# Altium footprint library KM_ALTIUM.PcbLib: 265 footprints (part 16 of 17)
Each footprint in its own frame and in the unit in brackets; x right, y up, seen from the top. Pads: shape width x height; smd on the part's side, far side on the other; paste and mask are expansions set on the pad; w line width, h text height; cw(c..) or ccw(c..) is an arc to the next point about the centre after c.
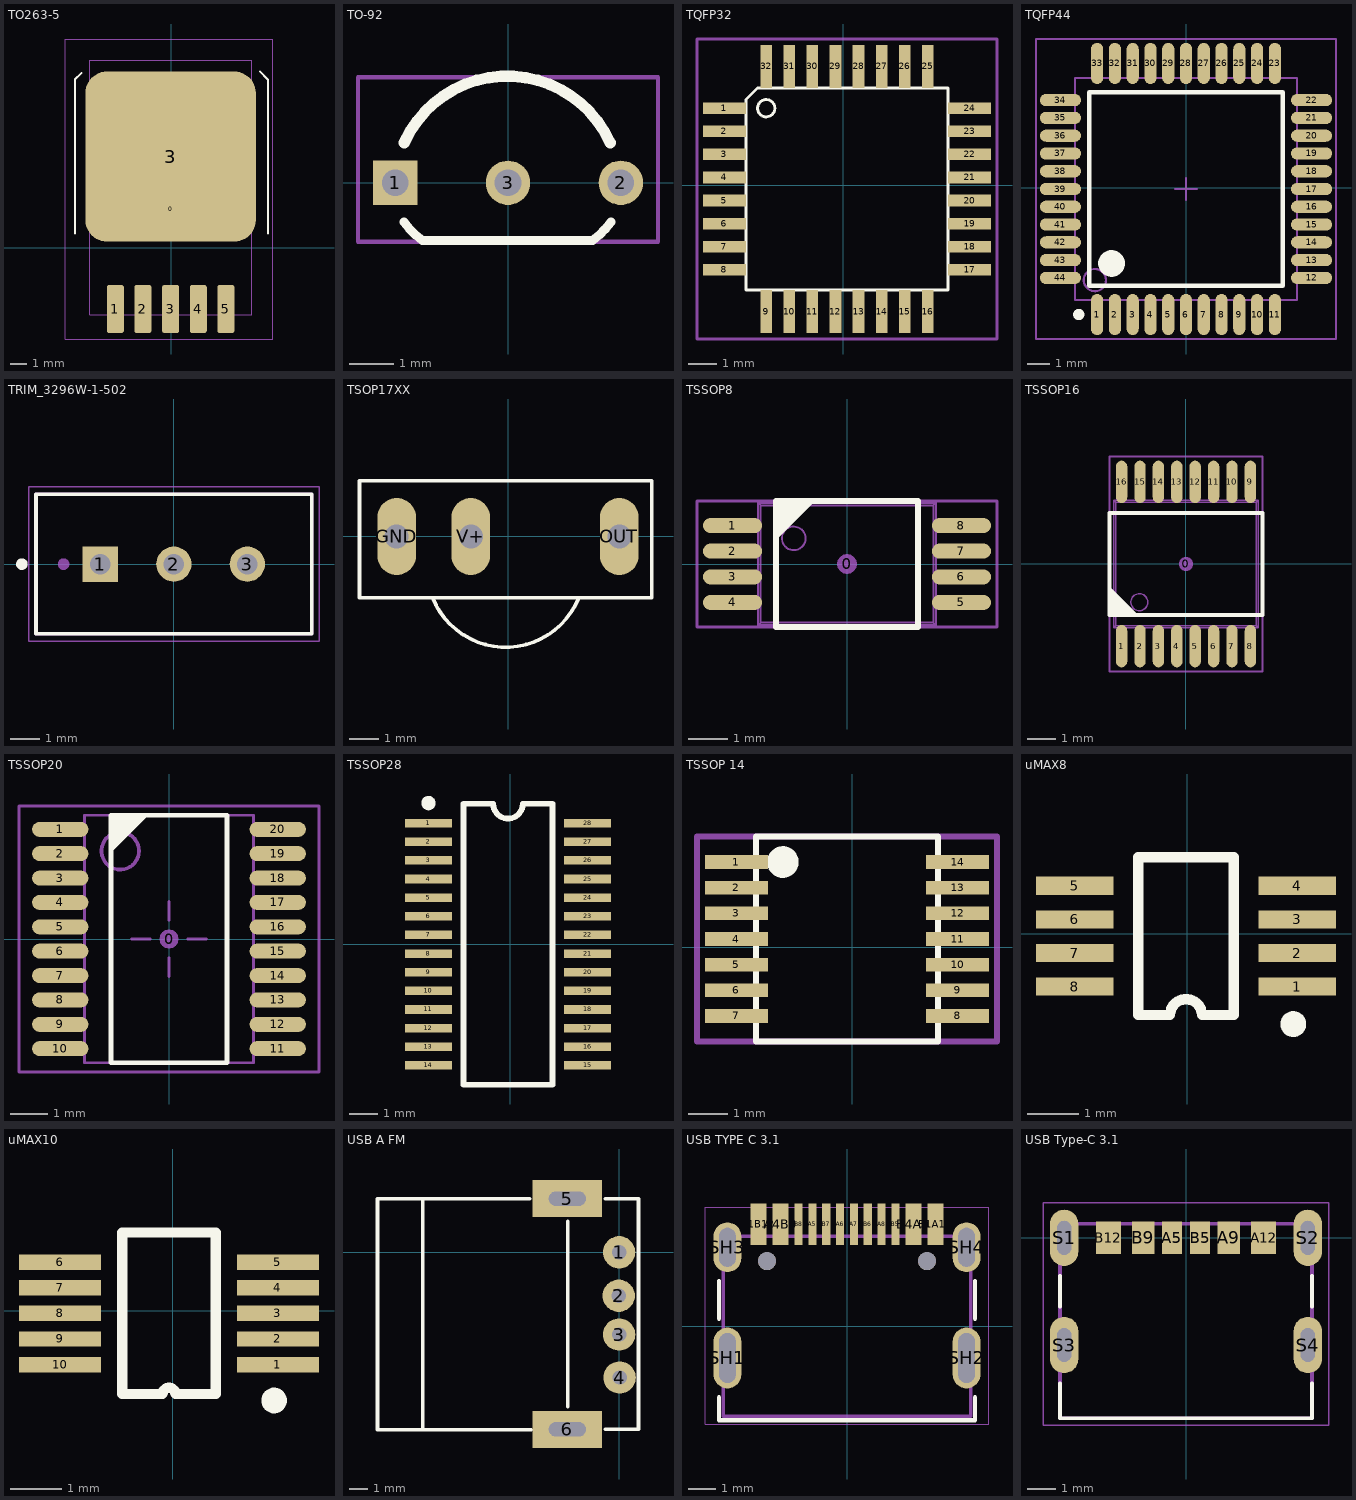
[diagram p15: the footprints below, top view; thin cyan lines are the x and y axes]

## TO263-5 [mm]
pads (7):
  round 0.5 on Mech15: 0(-0.025,2.388)
  rrect25% 1.05x2.95 smd: 1(-3.435,-3.762) 2(-1.73,-3.762) 3(-0.025,-3.762) 4(1.68,-3.762) 5(3.385,-3.762)
  rrect25% 10.5x10.5 smd: 3(-0.025,5.638)
Top Overlay:
  lines w0.127: -5.925,0.888 -5.925,10.388 -5.525,10.788 ; 5.475,10.888 5.975,10.388 5.975,0.888
Mechanical 13:
  lines w0.076: -5.025,-4.102 -5.025,11.568 4.975,11.568 4.975,-4.102 -5.025,-4.102
Mechanical 15:
  lines w0.076: -6.525,-5.612 -6.525,12.888 6.275,12.888 6.275,-5.612 -6.525,-5.612
3D body "TO-263-5.stp": height 4.56, standoff 0, extent -5.106,-4.34 5.054,9.675

## TO-92 [mm]
pads (3):
  rect 1x1 hole 0.6: 1(-2.54,0)
  round 1 hole 0.6: 2(2.54,0) 3(0,0)
Top Overlay:
  lines w0.2: -2.342,-0.884 ccw(c-0.93,0.113) -1.925,-1.3 ; -1.9,-1.3 1.9,-1.3 ccw(c0.905,0.113) 2.317,-0.884
  lines w0.254: -2.335,0.9 cw(c-0.017,-0.14) 2.3,0.9
Mechanical 15:
  lines w0.1: -3.377,-1.325 -3.377,2.375 3.377,2.375 3.377,-1.325 -3.377,-1.325
3D body "p210_TO-92.stp": height 8.6, standoff -8.5, extent -2.74,-1.28 2.74,2.32

## TQFP32 [mm]
pads (32):
  rect 1.5x0.406 smd: 1(-4.123,2.673) 2(-4.123,1.873) 3(-4.123,1.073) 4(-4.123,0.273) 5(-4.123,-0.527) 6(-4.123,-1.327) 7(-4.123,-2.127) 8(-4.123,-2.927) 17(4.377,-2.927) 18(4.377,-2.127) 19(4.377,-1.327) 20(4.377,-0.527) 21(4.377,0.273) 22(4.377,1.073) 23(4.377,1.873) 24(4.377,2.673)
  rect 0.406x1.5 smd: 9(-2.673,-4.377) 10(-1.873,-4.377) 11(-1.073,-4.377) 12(-0.273,-4.377) 13(0.527,-4.377) 14(1.327,-4.377) 15(2.127,-4.377) 16(2.927,-4.377) 25(2.927,4.123) 26(2.127,4.123) 27(1.327,4.123) 28(0.527,4.123) 29(-0.273,4.123) 30(-1.073,4.123) 31(-1.873,4.123) 32(-2.673,4.123)
Top Overlay:
  circle w0.102: c-2.673,2.673 r0.3
  lines w0.102: -3.373,-3.627 -3.373,2.977 -2.977,3.373 3.627,3.373 3.627,-3.627 -3.373,-3.627
Mechanical 3:
  lines w0.102: -5.073,-5.327 -5.073,5.073 5.327,5.073 5.327,-5.327 -5.073,-5.327
3D body "User Library-TQFP-32.STEP": height 1.45, standoff -0.01, extent -4.373,-4.627 4.627,4.373

## TQFP44 [mm]
pads (44):
  oval 0.55x1.85 smd: 1(-4,-5.701) 2(-3.2,-5.701) 3(-2.4,-5.701) 4(-1.6,-5.701) 5(-0.8,-5.701) 6(0,-5.701) 7(0.8,-5.701) 8(1.6,-5.701) 9(2.4,-5.701) 10(3.2,-5.701) 11(4,-5.701) 23(4,5.599) 24(3.2,5.599) 25(2.4,5.599) 26(1.6,5.599) 27(0.8,5.599) 28(0,5.599) 29(-0.8,5.599) 30(-1.6,5.599) 31(-2.4,5.599) 32(-3.2,5.599) 33(-4,5.599)
  oval 1.85x0.55 smd: 12(5.65,-4.051) 13(5.65,-3.251) 14(5.65,-2.451) 15(5.65,-1.651) 16(5.65,-0.851) 17(5.65,-0.051) 18(5.65,0.749) 19(5.65,1.549) 20(5.65,2.349) 21(5.65,3.149) 22(5.65,3.949) 34(-5.65,3.949) 35(-5.65,3.149) 36(-5.65,2.349) 37(-5.65,1.549) 38(-5.65,0.749) 39(-5.65,-0.051) 40(-5.65,-0.851) 41(-5.65,-1.651) 42(-5.65,-2.451) 43(-5.65,-3.251) 44(-5.65,-4.051)
Top Overlay:
  circle w0.25: c-4.825,-5.701 r0.125
  circle w0.6: c-3.35,-3.401 r0.3
  lines w0.2: -4.35,-4.401 4.35,-4.401 4.35,4.299 -4.35,4.299 -4.35,-4.401
Mechanical 13:
  circle w0.1: c-4.1,-4.151 r0.5
  lines w0.1: -5,-5.051 5,-5.051 5,4.949 -5,4.949 -5,-5.051
Mechanical 15:
  lines w0.1: -0.5,-0.051 0.5,-0.051 ; 0,-0.551 0,0.449 ; -6.75,-6.801 6.75,-6.801 6.75,6.699 -6.75,6.699 -6.75,-6.801
3D body "User Library-TQFP44-1.STEP": height 1.1, standoff 0, extent -6.009,-6.085 6.009,5.933

## TRIM_3296W-1-502 [mm]
pads (3):
  rect 1.218x1.218 hole 0.71: 1(-2.54,0)
  round 1.218 hole 0.71: 2(0,0) 3(2.54,0)
Top Overlay:
  circle w0.2: c-5.25,0 r0.1
  lines w0.127: -4.765,-2.41 4.765,-2.41 4.765,2.42 -4.765,2.42 -4.765,-2.41
Mechanical 13:
  circle w0.2: c-3.81,0 r0.1
  lines w0.127: -4.765,-2.41 -4.765,2.42 4.765,2.42 4.765,-2.41 -4.765,-2.41
Mechanical 15:
  lines w0.05: -5.015,-2.66 -5.015,2.67 5.015,2.67 5.015,-2.66 -5.015,-2.66
3D body "step_temp.STEP": height 11.55, standoff -7.72, extent -4.765,-2.41 4.765,2.42

## TSOP17XX [mil]
pads (3):
  oval 52x104 hole 32: GND(-150,0) OUT(150,0) V+(-50,0)
Top Overlay:
  lines w5: -101.44,-82.82 ccw(c-3.15,-43.11) 95.14,-82.82 ; -200,-82.48 -200,75 -101.57,75 95.28,75 193.7,75 193.7,-82.48 95.28,-82.48 -101.57,-82.48 -200,-82.48
3D body "step_temp.STEP": height 1224.41, standoff 0, extent -196.85,-165.35 196.85,62.99

## TSSOP8 [mm]
pads (9):
  round 0.508 on Mech15: 0(0,0)
  oval 1.5x0.38 smd paste-0.051: 1(-2.9,0.975) 2(-2.9,0.325) 3(-2.9,-0.325) 4(-2.9,-0.975) 5(2.9,-0.975) 6(2.9,-0.325) 7(2.9,0.325) 8(2.9,0.975)
Top Overlay:
  region: -1.8,1.6 -0.8,1.6 -1.8,0.6
  lines w0.152: -1.8,-1.6 -1.8,1.6 1.8,1.6 1.8,-1.6 -1.8,-1.6
  text "." at -2.85,1.7 h0.1
Top Solder:
  rectangle: -3.5,-1.016 -2.3,1.016
  region: 3.5,1.016 2.3,1.016 2.3,-1.016 3.5,-1.016
Mechanical 13:
  circle w0.05: c-1.35,0.65 r0.3
  lines w0.05: -2.839,-1.125 -2.839,-0.825 ; -2.839,-0.475 -2.839,-0.175 ; -2.839,0.175 -2.839,0.475 ; -2.839,0.825 -2.839,1.125 ; -2.795,-1.125 -2.795,-0.825 ; -2.795,-0.475 -2.795,-0.175 ; -2.795,0.175 -2.795,0.475 ; -2.795,0.825 -2.795,1.125 ; -2.693,-1.125 -2.693,-0.825 ; -2.693,-0.475 -2.693,-0.175 ; -2.693,0.175 -2.693,0.475 ; -2.693,0.825 -2.693,1.125 ; -2.5,-1.125 -2.5,-0.825 ; -2.5,-0.475 -2.5,-0.175 ; -2.5,0.175 -2.5,0.475 ; -2.5,0.825 -2.5,1.125 ; -2.25,-1.125 -3.25,-1.125 -3.25,-0.825 -2.25,-0.825 ; -2.25,-0.475 -3.25,-0.475 -3.25,-0.175 -2.25,-0.175 ; -2.25,0.175 -3.25,0.175 -3.25,0.475 -2.25,0.475 ; -2.25,0.825 -3.25,0.825 -3.25,1.125 -2.25,1.125 ; 2.25,-1.125 3.25,-1.125 3.25,-0.825 2.25,-0.825 ; 2.25,-0.475 3.25,-0.475 3.25,-0.175 2.25,-0.175 ; 2.25,0.175 3.25,0.175 3.25,0.475 2.25,0.475 ; 2.25,0.825 3.25,0.825 3.25,1.125 2.25,1.125 ; 2.5,-1.125 2.5,-0.825 ; 2.5,-0.475 2.5,-0.175 ; 2.5,0.175 2.5,0.475 ; 2.5,0.825 2.5,1.125 ; 2.693,-1.125 2.693,-0.825 ; 2.693,-0.475 2.693,-0.175 ; 2.693,0.175 2.693,0.475 ; 2.693,0.825 2.693,1.125 ; 2.795,-1.125 2.795,-0.825 ; 2.795,-0.475 2.795,-0.175 ; 2.795,0.175 2.795,0.475 ; 2.795,0.825 2.795,1.125 ; 2.839,-1.125 2.839,-0.825 ; 2.839,-0.475 2.839,-0.175 ; 2.839,0.175 2.839,0.475 ; 2.839,0.825 2.839,1.125 ; -2.25,-1.55 -2.25,1.55 ; -2.25,-1.55 -2.187,-1.487 ; -2.25,-1.55 2.25,-1.55 ; -2.25,1.55 2.25,1.55 ; -2.25,1.55 -2.187,1.487 ; -2.187,-1.487 -2.187,1.487 ; -2.187,-1.487 2.187,-1.487 ; -2.187,1.487 2.187,1.487 ; 2.187,-1.487 2.187,1.487 ; 2.187,-1.487 2.25,-1.55 ; 2.187,1.487 2.25,1.55 ; 2.25,-1.55 2.25,1.55
Mechanical 15:
  lines w0.076: -3.8,-1.6 -3.8,1.6 3.8,1.6 3.8,-1.6 -3.8,-1.6
3D body "TSSOP-8.STEP": height 1.19, standoff -0.01, extent -3.25,-1.55 3.25,1.55

## TSSOP16 [mm]
pads (17):
  round 0.508 on Mech15: 0(0,0)
  oval 0.4x1.5 smd paste-0.051: 1(-2.275,-2.9) 2(-1.625,-2.9) 3(-0.975,-2.9) 4(-0.325,-2.9) 5(0.325,-2.9) 6(0.975,-2.9) 7(1.625,-2.9) 8(2.275,-2.9) 9(2.275,2.9) 10(1.625,2.9) 11(0.975,2.9) 12(0.325,2.9) 13(-0.325,2.9) 14(-0.975,2.9) 15(-1.625,2.9) 16(-2.275,2.9)
Top Overlay:
  region: -2.7,-1.8 -2.7,-0.8 -1.7,-1.8
  lines w0.152: -2.7,-1.8 -2.7,1.8 2.7,1.8 2.7,-1.8 -2.7,-1.8
  text "." at -3,-2.85 h0.1
Top Solder:
  region: -2.4,3.5 -2.4,2.3 2.4,2.3 2.4,3.5
  region: 2.4,-3.5 2.4,-2.3 -2.4,-2.3 -2.4,-3.5
Mechanical 13:
  circle w0.05: c-1.65,-1.35 r0.3
  lines w0.05: -2.425,-2.839 -2.125,-2.839 ; -2.425,-2.795 -2.125,-2.795 ; -2.425,-2.693 -2.125,-2.693 ; -2.425,-2.5 -2.125,-2.5 ; -2.425,-2.25 -2.425,-3.25 -2.125,-3.25 -2.125,-2.25 ; -2.425,2.25 -2.425,3.25 -2.125,3.25 -2.125,2.25 ; -2.425,2.5 -2.125,2.5 ; -2.425,2.693 -2.125,2.693 ; -2.425,2.795 -2.125,2.795 ; -2.425,2.839 -2.125,2.839 ; -1.775,-2.839 -1.475,-2.839 ; -1.775,-2.795 -1.475,-2.795 ; -1.775,-2.693 -1.475,-2.693 ; -1.775,-2.5 -1.475,-2.5 ; -1.775,-2.25 -1.775,-3.25 -1.475,-3.25 -1.475,-2.25 ; -1.775,2.25 -1.775,3.25 -1.475,3.25 -1.475,2.25 ; -1.775,2.5 -1.475,2.5 ; -1.775,2.693 -1.475,2.693 ; -1.775,2.795 -1.475,2.795 ; -1.775,2.839 -1.475,2.839 ; -1.125,-2.839 -0.825,-2.839 ; -1.125,-2.795 -0.825,-2.795 ; -1.125,-2.693 -0.825,-2.693 ; -1.125,-2.5 -0.825,-2.5 ; -1.125,-2.25 -1.125,-3.25 -0.825,-3.25 -0.825,-2.25 ; -1.125,2.25 -1.125,3.25 -0.825,3.25 -0.825,2.25 ; -1.125,2.5 -0.825,2.5 ; -1.125,2.693 -0.825,2.693 ; -1.125,2.795 -0.825,2.795 ; -1.125,2.839 -0.825,2.839 ; -0.475,-2.839 -0.175,-2.839 ; -0.475,-2.795 -0.175,-2.795 ; -0.475,-2.693 -0.175,-2.693 ; -0.475,-2.5 -0.175,-2.5 ; -0.475,-2.25 -0.475,-3.25 -0.175,-3.25 -0.175,-2.25 ; -0.475,2.25 -0.475,3.25 -0.175,3.25 -0.175,2.25 ; -0.475,2.5 -0.175,2.5 ; -0.475,2.693 -0.175,2.693 ; -0.475,2.795 -0.175,2.795 ; -0.475,2.839 -0.175,2.839 ; 0.175,-2.839 0.475,-2.839 ; 0.175,-2.795 0.475,-2.795 ; 0.175,-2.693 0.475,-2.693 ; 0.175,-2.5 0.475,-2.5 ; 0.175,-2.25 0.175,-3.25 0.475,-3.25 0.475,-2.25 ; 0.175,2.25 0.175,3.25 0.475,3.25 0.475,2.25 ; 0.175,2.5 0.475,2.5 ; 0.175,2.693 0.475,2.693 ; 0.175,2.795 0.475,2.795 ; 0.175,2.839 0.475,2.839 ; 0.825,-2.839 1.125,-2.839 ; 0.825,-2.795 1.125,-2.795 ; 0.825,-2.693 1.125,-2.693 ; 0.825,-2.5 1.125,-2.5 ; 0.825,-2.25 0.825,-3.25 1.125,-3.25 1.125,-2.25 ; 0.825,2.25 0.825,3.25 1.125,3.25 1.125,2.25 ; 0.825,2.5 1.125,2.5 ; 0.825,2.693 1.125,2.693 ; 0.825,2.795 1.125,2.795 ; 0.825,2.839 1.125,2.839 ; 1.475,-2.839 1.775,-2.839 ; 1.475,-2.795 1.775,-2.795 ; 1.475,-2.693 1.775,-2.693 ; 1.475,-2.5 1.775,-2.5 ; 1.475,-2.25 1.475,-3.25 1.775,-3.25 1.775,-2.25 ; 1.475,2.25 1.475,3.25 1.775,3.25 1.775,2.25 ; 1.475,2.5 1.775,2.5 ; 1.475,2.693 1.775,2.693 ; 1.475,2.795 1.775,2.795 ; 1.475,2.839 1.775,2.839 ; 2.125,-2.839 2.425,-2.839 ; 2.125,-2.795 2.425,-2.795 ; 2.125,-2.693 2.425,-2.693 ; 2.125,-2.5 2.425,-2.5 ; 2.125,-2.25 2.125,-3.25 2.425,-3.25 2.425,-2.25 ; 2.125,2.25 2.125,3.25 2.425,3.25 2.425,2.25 ; 2.125,2.5 2.425,2.5 ; 2.125,2.693 2.425,2.693 ; 2.125,2.795 2.425,2.795 ; 2.125,2.839 2.425,2.839 ; -2.55,-2.25 -2.487,-2.187 ; -2.55,-2.25 -2.55,2.25 ; -2.55,-2.25 2.55,-2.25 ; -2.55,2.25 -2.487,2.187 ; -2.55,2.25 2.55,2.25 ; -2.487,-2.187 -2.487,2.187 ; -2.487,-2.187 2.487,-2.187 ; -2.487,2.187 2.487,2.187 ; 2.487,-2.187 2.55,-2.25 ; 2.487,-2.187 2.487,2.187 ; 2.487,2.187 2.55,2.25 ; 2.55,-2.25 2.55,2.25
Mechanical 15:
  lines w0.076: -2.7,-3.8 -2.7,3.8 2.7,3.8 2.7,-3.8 -2.7,-3.8
3D body "TSSOP65P640X120-16N.STEP": height 1.2, standoff 0, extent -2.55,-3.25 2.55,3.25

## TSSOP20 [mm]
pads (21):
  round 0.508 on Mech15 mask+0.127: 0(0,0)
  oval 1.5x0.4 smd paste-1 mask+0.127: 1(-2.9,2.925) 2(-2.9,2.275) 3(-2.9,1.625) 4(-2.9,0.975) 5(-2.9,0.325) 6(-2.9,-0.325) 7(-2.9,-0.975) 8(-2.9,-1.625) 9(-2.9,-2.275) 10(-2.9,-2.925) 11(2.9,-2.925) 12(2.9,-2.275) 13(2.9,-1.625) 14(2.9,-0.975) 15(2.9,-0.325) 16(2.9,0.325) 17(2.9,0.975) 18(2.9,1.625) 19(2.9,2.275) 20(2.9,2.925)
Top Overlay:
  region: -1.55,3.3 -0.55,3.3 -1.55,2.3
  lines w0.127: -1.55,-3.3 1.55,-3.3 1.55,3.3 -1.55,3.3 -1.55,-3.3
  text "." at -2.85,3.7 h0.1
Top Paste:
  region: 3.5,-2.775 2.3,-2.775 2.3,-3.075 3.5,-3.075
  region: 3.5,-2.125 2.3,-2.125 2.3,-2.425 3.5,-2.425
  region: 3.5,-1.475 2.3,-1.475 2.3,-1.775 3.5,-1.775
  rectangle: -3.5,-1.775 -2.3,-1.475
  rectangle: -3.5,-2.425 -2.3,-2.125
  rectangle: -3.5,-3.075 -2.3,-2.775
  rectangle: -3.5,-1.125 -2.3,-0.825
  rectangle: -3.5,-0.475 -2.3,-0.175
  rectangle: -3.5,0.175 -2.3,0.475
  rectangle: -3.5,0.825 -2.3,1.125
  rectangle: -3.5,1.475 -2.3,1.775
  rectangle: -3.5,2.125 -2.3,2.425
  rectangle: -3.5,2.775 -2.3,3.075
  region: 3.5,3.075 2.3,3.075 2.3,2.775 3.5,2.775
  region: 3.5,2.425 2.3,2.425 2.3,2.125 3.5,2.125
  region: 3.5,1.775 2.3,1.775 2.3,1.475 3.5,1.475
  region: 3.5,1.125 2.3,1.125 2.3,0.825 3.5,0.825
  region: 3.5,0.475 2.3,0.475 2.3,0.175 3.5,0.175
  region: 3.5,-0.175 2.3,-0.175 2.3,-0.475 3.5,-0.475
  region: 3.5,-0.825 2.3,-0.825 2.3,-1.125 3.5,-1.125
Mechanical 13:
  circle w0.1: c-1.3,2.35 r0.5
  lines w0.076: -2.25,-3.3 2.25,-3.3 2.25,3.3 -2.25,3.3 -2.25,-3.3
Mechanical 15:
  lines w0.076: -1,0 -0.5,0 ; 0,-1 0,-0.5 ; 0,0.5 0,1 ; 0.5,0 1,0 ; -4,-3.55 4,-3.55 4,3.55 -4,3.55 -4,-3.55
3D body "TSSOP65P640X120-20N.STEP": height 1.2, standoff 0, extent -3.2,-3.25 3.2,3.25

## TSSOP28 [mm]
pads (28):
  rect 1.65x0.3 smd: 1(-2.851,4.225) 2(-2.851,3.575) 3(-2.851,2.925) 4(-2.851,2.275) 5(-2.851,1.625) 6(-2.851,0.975) 7(-2.851,0.325) 8(-2.851,-0.325) 9(-2.851,-0.975) 10(-2.851,-1.625) 11(-2.851,-2.275) 12(-2.851,-2.925) 13(-2.851,-3.575) 14(-2.851,-4.225) 15(2.699,-4.225) 16(2.699,-3.575) 17(2.699,-2.925) 18(2.699,-2.275) 19(2.699,-1.625) 20(2.699,-0.975) 21(2.699,-0.325) 22(2.699,0.325) 23(2.699,0.975) 24(2.699,1.625) 25(2.699,2.275) 26(2.699,2.925) 27(2.699,3.575) 28(2.699,4.225)
Top Overlay:
  circle w0.25: c-2.851,4.925 r0.125
  lines w0.2: -1.626,-4.9 1.474,-4.9 1.474,4.9 0.44,4.9 cw(c-0.076,4.9) -0.593,4.9 -1.626,4.9 -1.626,-4.9
3D body "User Library-tssop28.STEP": height 1.2, standoff 0, extent -3.276,-4.9 3.124,4.9

## TSSOP 14 [mm]
pads (14):
  rect 1.6x0.35 smd: 1(-2.927,2.153) 2(-2.927,1.503) 3(-2.927,0.853) 4(-2.927,0.203) 5(-2.927,-0.447) 6(-2.927,-1.097) 7(-2.927,-1.747) 8(2.673,-1.747) 9(2.673,-1.097) 10(2.673,-0.447) 11(2.673,0.203) 12(2.673,0.853) 13(2.673,1.503) 14(2.673,2.153)
Top Overlay:
  circle w0.4: c-1.752,2.153 r0.2
  lines w0.152: -2.427,-2.397 2.173,-2.397 2.173,2.803 -2.427,2.803 -2.427,-2.397
Mechanical 3:
  lines w0.152: -3.927,-2.397 3.673,-2.397 3.673,2.803 -3.927,2.803 -3.927,-2.397
3D body "User Library-tssop14-2.step": height 1.2, standoff 0, extent -3.327,-2.347 3.073,2.753

## uMAX8 [mm]
pads (8):
  rect 1.5x0.35 smd: 1(2.126,-1.026) 2(2.126,-0.376) 3(2.126,0.274) 4(2.126,0.924) 5(-2.177,0.924) 6(-2.177,0.274) 7(-2.177,-0.376) 8(-2.177,-1.026)
Top Overlay:
  circle w0.25: c2.05,-1.751 r0.125
  lines w0.2: -0.95,-1.576 -0.334,-1.576 cw(c-0.025,-1.576) 0.283,-1.576 0.9,-1.576 0.9,1.474 -0.95,1.474 -0.95,-1.576
3D body "SW3dPS-uMAX8.STEP": height 0.95, standoff 0, extent -2.526,-1.552 2.475,1.448

## uMAX10 [mm]
pads (10):
  rect 1.6x0.3 smd: 1(2.05,-1.051) 2(2.05,-0.551) 3(2.05,-0.051) 4(2.05,0.449) 5(2.05,0.949) 6(-2.202,0.949) 7(-2.202,0.449) 8(-2.202,-0.051) 9(-2.202,-0.551) 10(-2.202,-1.051)
Top Overlay:
  circle w0.25: c1.974,-1.751 r0.125
  lines w0.2: -0.991,-1.626 -0.201,-1.626 cw(c-0.076,-1.626) 0.049,-1.626 0.838,-1.626 0.838,1.524 -0.991,1.524 -0.991,-1.626
3D body "User Library-uMAX10-1.STEP": height 1.1, standoff 0, extent -2.619,-1.576 2.466,1.474

## USB A FM [mil]
pads (6):
  round 70 hole 31: 1(0,0) 2(-1,-94) 3(0,-178) 4(1,-271)
  rect 150x80 hole 31 slot 80 at 0 deg: 5(-112,116) 6(-112,-383)
Top Overlay:
  lines w8: -523,-379 -523,116 -194,116 ; -523,-364 -523,-384 -518,-384 -190,-384 ; -425,-384 -425,114 ; -111,-334 -111,67 ; -30,-383 42,-383 42,116 -30,116
3D body "Samtec-USB-A-S-F-B-TH.STEP": height 101.33, standoff -328.74, extent -522.56,-442.02 32.56,180.01

## USB TYPE C 3.1 [mm] "16P"
pads (18):
  rect 0.59x1.5 smd mask+0.064: A1B12(-3.2,3.679) A4B9(-2.4,3.679) B1A12(3.2,3.679) B4A9(2.4,3.679)
  rect 0.298x1.5 smd mask+0.064: A5(-1.25,3.679) A6(-0.25,3.679) A7(0.25,3.679) A8(1.25,3.679) B5(1.75,3.679) B6(0.75,3.679) B7(-0.75,3.679) B8(-1.75,3.679)
  oval 1x2.2 hole 0.6 slot 1.8 at 90 deg mask+0.064: SH1(-4.32,-1.15) SH2(4.32,-1.15)
  oval 1x1.8 hole 0.6 slot 1.4 at 90 deg mask+0.064: SH3(-4.32,2.85) SH4(4.32,2.85)
  round 0.65 hole 0.65: ""(-2.89,2.35) ""(2.89,2.35)
Top Overlay:
  lines w0.15: -4.62,-2.57 -4.62,-3.4 4.62,-3.4 4.62,-2.57 ; -4.62,0.27 -4.62,1.63 ; 4.62,0.27 4.62,1.63
Mechanical 13:
  lines w0.13: -4.47,-3.25 4.47,-3.25 4.47,3.25 -4.47,3.25 -4.47,-3.25
Mechanical 15:
  lines w0.01: -5.12,-3.55 -5.12,4.3 5.12,4.3 5.12,-3.55 -5.12,-3.55
3D body "USB_type_C_smd_12p.stp": height 3.2, standoff -1.27, extent -4.6,-4 4.6,3.95

## USB Type-C 3.1 [mm] "6P, SMD"
pads (10):
  rect 0.7x1.15 smd: A5(-0.5,0.005) B5(0.5,0.005)
  rect 0.8x1.15 smd: A9(1.52,0.005) B9(-1.52,0.005)
  rect 0.9x1.15 smd: A12(2.75,0.005) B12(-2.75,0.005)
  oval 1x2 hole 0.5 slot 1.2 at 90 deg: S1(-4.32,0) S2(4.32,0) S3(-4.32,-3.8) S4(4.32,-3.8)
Top Overlay:
  lines w0.127: -4.47,-5.15 -4.47,-6.4 4.47,-6.4 4.47,-5.15 ; -4.47,-2.45 -4.47,-1.35 ; 4.47,-2.45 4.47,-1.35
Mechanical 13:
  lines w0.127: -4.47,-6.4 4.47,-6.4 4.47,0.5 -4.47,0.5 -4.47,-6.4
Mechanical 15:
  lines w0.05: -5.07,-6.65 5.07,-6.65 5.07,1.25 -5.07,1.25 -5.07,-6.65
3D body "UJC-HP-3-SMT-TR--3DModel-STEP-56544.STEP": height 3.26, standoff -1, extent -4.47,-6.4 4.47,0.5